# Altium footprint library MP1584EN.PcbLib: 1 footprints
Each footprint in its own frame and in the unit in brackets; x right, y up, seen from the top. Pads: shape width x height; smd on the part's side, far side on the other; paste and mask are expansions set on the pad; w line width, h text height; cw(c..) or ccw(c..) is an arc to the next point about the centre after c.
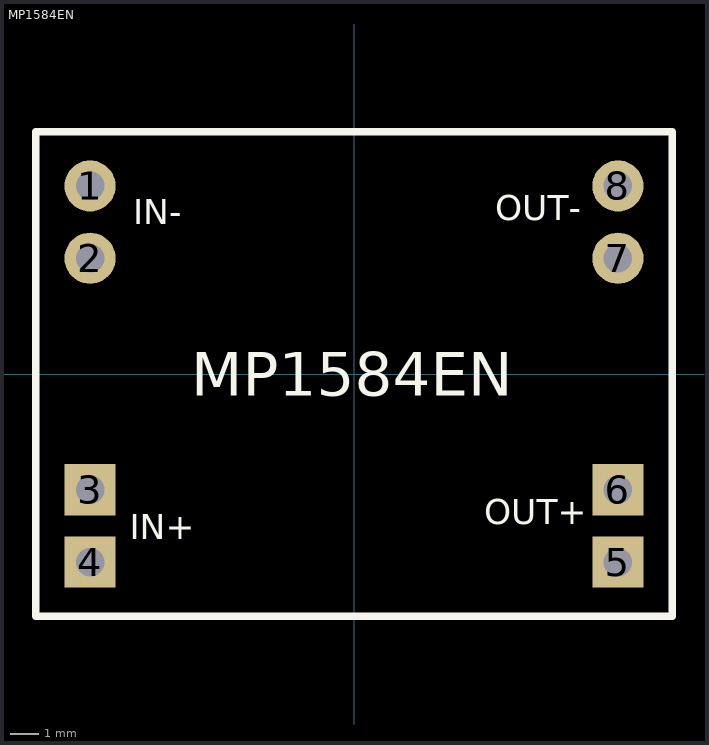
[diagram p0: the footprint, top view; thin cyan lines are the x and y axes]

## MP1584EN [mm] "Buck Converter"
pads (8):
  round 1.8 hole 1: 1(-9.271,6.604) 2(-9.271,4.064) 7(9.271,4.064) 8(9.271,6.604)
  rect 1.8x1.8 hole 1: 3(-9.271,-4.064) 4(-9.271,-6.604) 5(9.271,-6.604) 6(9.271,-4.064)
Top Overlay:
  lines w0.254: -11.176,-8.509 11.176,-8.509 11.176,8.509 -11.176,8.509 -11.176,-8.509
  text "IN+" at -7.874,-6.096 h1.52
  text "OUT+" at 4.572,-5.571 h1.52
  text "IN-" at -7.747,4.953 h1.52
  text "OUT-" at 4.953,5.097 h1.52
  text "MP1584EN" at -5.715,-0.762 h1.52
3D body "MP1584EN_pin.step": height 6.59, standoff -6.01, extent -11.05,-8.4 11.05,8.4